# EAGLE library part IC_MEM_AT45DB041D (library dp_devices.v6)
AT45DB041D 4-Mbit 2.5V to 3.6V Flash
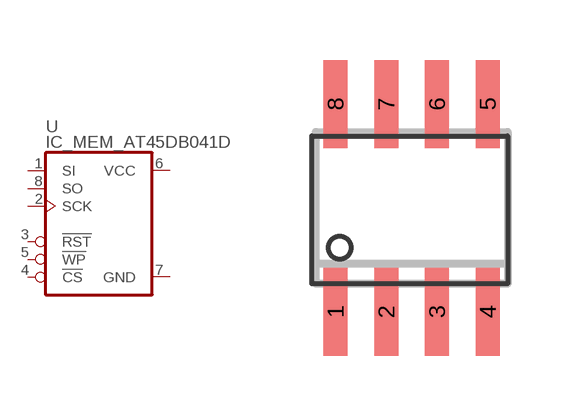
[diagram p202: symbol with the pads of SOIC-8; footprint SOIC-8]

Designator prefix U

## IC_MEM_AT45DB041D  [SOIC-8]
1  SI  in
2  SCK  in
3  !RST  in
4  !CS  in
5  !WP  in
6  VCC  pwr
7  GND  pwr
8  SO  out

## Footprint SOIC-8 (pad centres in mm)
smd 0.6 x 2.2: 1 -1.905,-2.6; 2 -0.635,-2.6; 3 0.635,-2.6; 4 1.905,-2.6; 5 1.905,2.6; 6 0.635,2.6; 7 -0.635,2.6; 8 -1.905,2.6